# Altium schematic symbol library Connector.SchLib: 231 symbols (part 2 of 2)
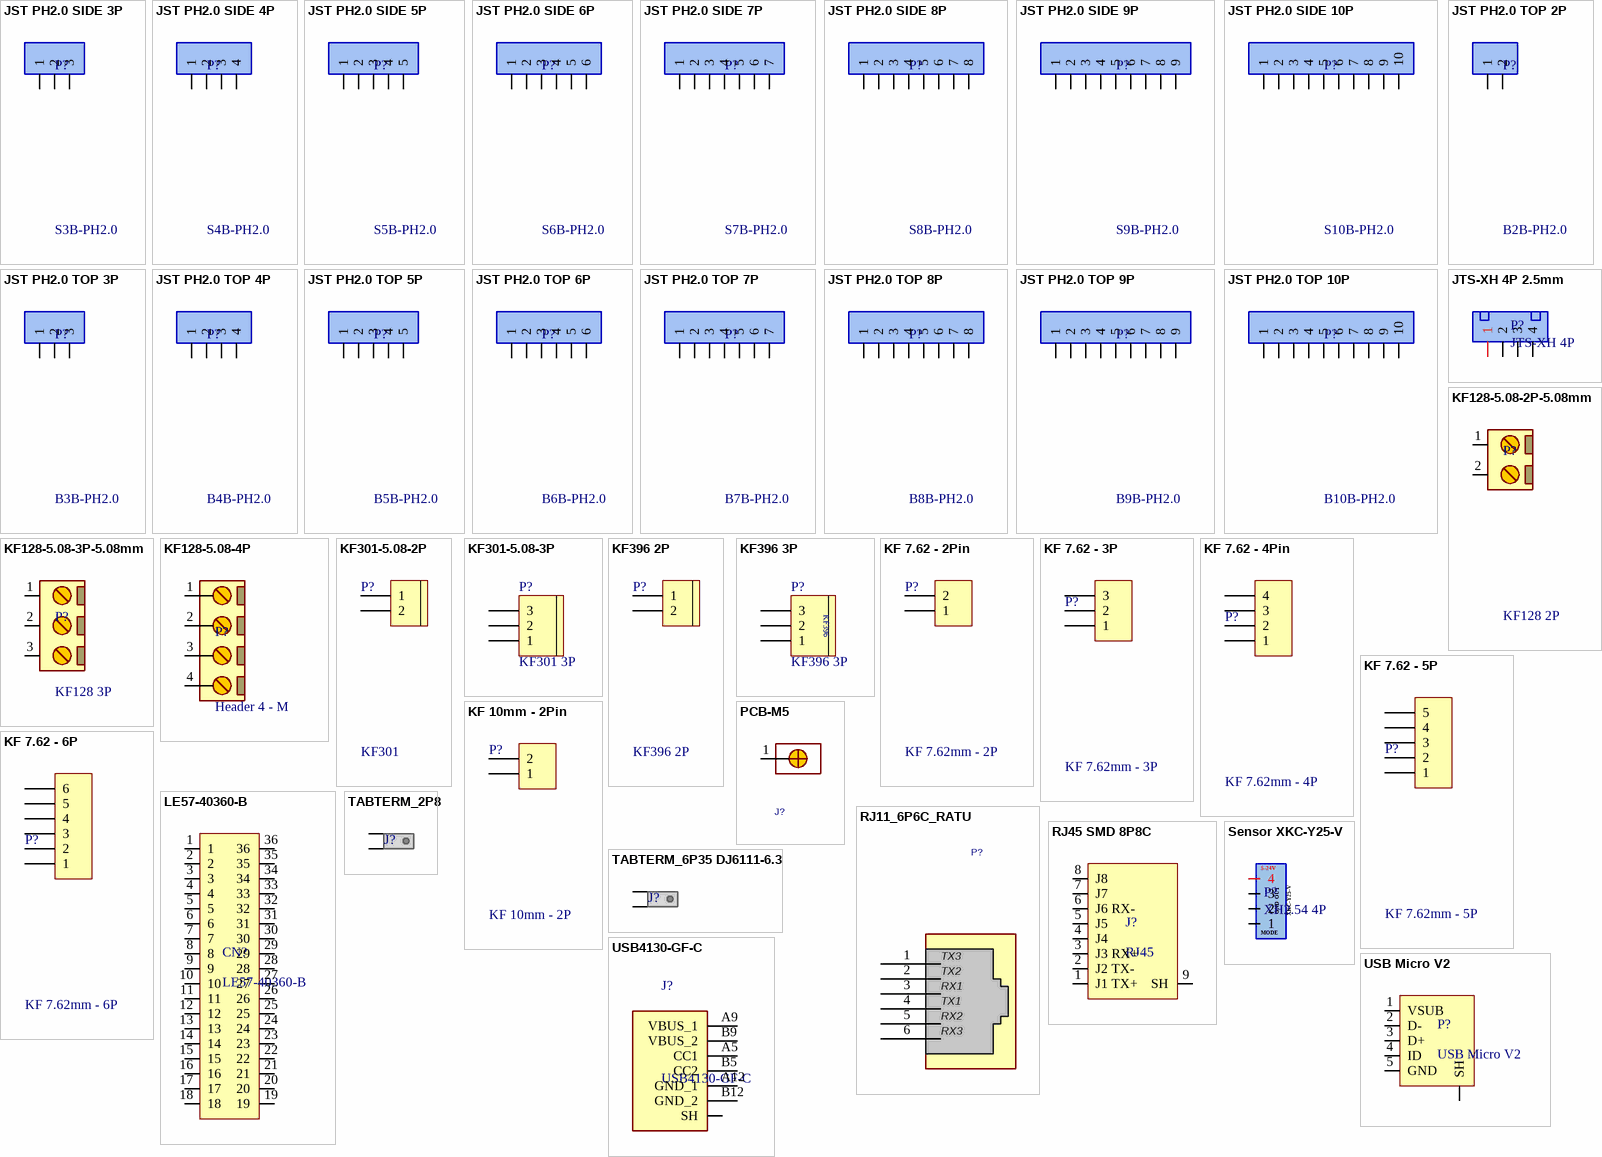
[diagram p7: symbols JST PH2.0 SIDE 3P to USB Micro V2]

## TABTERM_2P8
designator J?
Tab terminal FASTON 110, 2.8 mm width, 0.8 mm thickness
footprint TABTERM_2P8 (Tab terminal FASTON 110, 2.8 mm width, 0.8 mm thickness)
pins: 1, 2

## TABTERM_6P35 DJ6111-6.3
designator J?, comment DJ6111  (value not drawn)
Tab terminal FASTON 250, 6.35 mm width, 0.8 mm thickness; Code: 3007-037
footprint TABTERM_6P35 (Tab terminal FASTON 250, 6.35 mm width, 0.8 mm thickness)
pins: 1, 2

## USB4130-GF-C
designator J?
USB-C (USB TYPE-C) Receptacle Connector 24 (6+18 Dummy) Position Surface Mount, Through Hole; Code: N/A
footprint USB4130GFC
pins: A5 CC1, A9 VBUS_1, A12 GND_1, B5 CC2, B9 VBUS_2, B12 GND_2, SH

## USB Micro V2
designator P?
5 Pin, Imax 1.8A, 90*, SMD; Code: 3517-008; Designed by: nhox; Rule: UNIONINDEX=0|RULEKIND=Clearance|NETSCOPE=DifferentNets|LAYERKIND=SameLayer|NAME=Schematic Clearance Constraint|GAP=10mil|GENERICCLEARANCE=10mil|IGNOREPADTOPADCLEARANCEINFOOTPRINT=FALSE|OBJECTCLEARANCES=ClearanceObj_Arc-ClearanceObj_SMDPad:50000;ClearanceObj_Arc-ClearanceObj_Hole:0;ClearanceObj_Track-ClearanceObj_SMDPad:50000;ClearanceObj_Track-ClearanceObj_Hole:0;ClearanceObj_SMDPad-ClearanceObj_SMDPad:50000;ClearanceObj_SMDPad-ClearanceObj_Fill:50000;ClearanceObj_SMDPad-ClearanceObj_Poly:50000;ClearanceObj_SMDPad-ClearanceObj_Region:50000;ClearanceObj_SMDPad-ClearanceObj_Hole:0;ClearanceObj_THPad-ClearanceObj_Hole:0;ClearanceObj_Via-ClearanceObj_Hole:0;ClearanceObj_Fill-ClearanceObj_Hole:0;ClearanceObj_Poly-ClearanceObj_Hole:0;ClearanceObj_Region-ClearanceObj_Hole:0;ClearanceObj_Text-ClearanceObj_Hole:0|UNIT=Imperial
footprint USB MICRO v2
footprint 629105150921 (Micro USB 2.0 Type AB Horizontal)
pins: 1 VSUB, 2 D-, 3 D+, 4 ID, 5 GND, SH1 SH

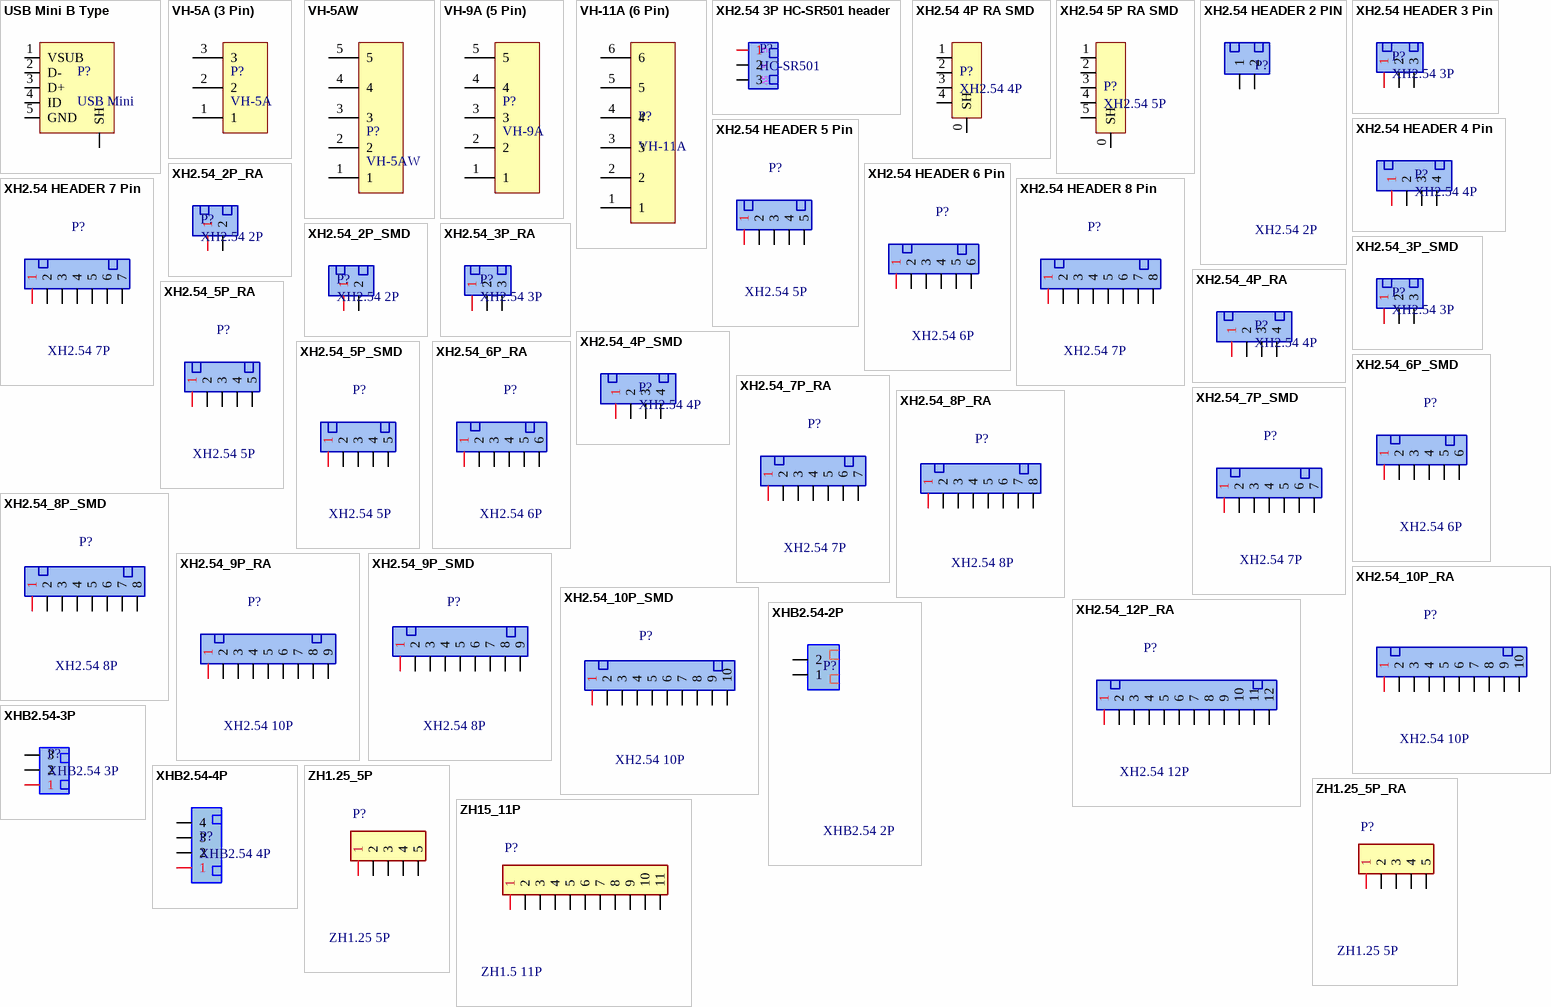
[diagram p5: symbols USB Mini B Type to ZH15_11P]

## USB Mini B Type
designator P?, comment USB Mini
USB Mini B Type, 5 Pin, Imax 1.0A, SMD; Code: 3517-030; Designed by: nhox; Rule: UNIONINDEX=0|RULEKIND=Clearance|NETSCOPE=DifferentNets|LAYERKIND=SameLayer|NAME=Schematic Clearance Constraint|GAP=10mil|GENERICCLEARANCE=10mil|IGNOREPADTOPADCLEARANCEINFOOTPRINT=FALSE|OBJECTCLEARANCES=ClearanceObj_Arc-ClearanceObj_SMDPad:50000;ClearanceObj_Arc-ClearanceObj_Hole:0;ClearanceObj_Track-ClearanceObj_SMDPad:50000;ClearanceObj_Track-ClearanceObj_Hole:0;ClearanceObj_SMDPad-ClearanceObj_SMDPad:50000;ClearanceObj_SMDPad-ClearanceObj_Fill:50000;ClearanceObj_SMDPad-ClearanceObj_Poly:50000;ClearanceObj_SMDPad-ClearanceObj_Region:50000;ClearanceObj_SMDPad-ClearanceObj_Hole:0;ClearanceObj_THPad-ClearanceObj_Hole:0;ClearanceObj_Via-ClearanceObj_Hole:0;ClearanceObj_Fill-ClearanceObj_Hole:0;ClearanceObj_Poly-ClearanceObj_Hole:0;ClearanceObj_Region-ClearanceObj_Hole:0;ClearanceObj_Text-ClearanceObj_Hole:0|UNIT=Imperial
footprint USB_MINI_B_Type (5075BMR-05-SM)
pins: 0 SH, 1 VSUB, 2 D-, 3 D+, 4 ID, 5 GND

## VH-5A (3 Pin)
designator P?, comment VH-5A
VH-5A 3.96mm; Designed by: nhox; Code: N/A
footprint VH-5A-(3 PIN)
pins: 1, 2, 3

## VH-5AW
designator P?
VH-5AW 3.96mm; Code: N/A
footprint VH-5AW 3.96mm (3.96mm)
pins: 1, 2, 3, 4, 5

## VH-9A (5 Pin)
designator P?, comment VH-9A
VH-9A 3.96mm; Designed by: nhox; Code: N/A
footprint VH-9A (5 Pin)
pins: 1, 2, 3, 4, 5

## VH-11A (6 Pin)
designator P?, comment VH-11A
VH-11A 3.96mm; Designed by: nhox; Code: N/A
footprint VH-11A-(6 PIN)
pins: 1, 2, 3, 4, 5, 6

## XH2.54 3P HC-SR501 header
designator P?, comment HC-SR501
HC-SR501 XH-T-3 HEADER 3 Pin XH2.54 / Them connetor xh2.54 4P; Code: M-6103-017, 3509-002
footprint XH2.54_3P (PW10-xx-M, JST-BxB-XH-A pitch: 2.5mm)
pins: 1, 2, 3
text: G; S; 5V

## XH2.54 4P RA SMD
designator P?, comment XH2.54 4P
XH2.54 4P RA SMD; Designed by: Nhox; Code: N/A
footprint XH2.54-4P-RA-SMD
pins: 0 SH, 1, 2, 3, 4

## XH2.54 5P RA SMD
designator P?, comment XH2.54 5P
XH2.54 5P RA SMD; Designed by: Nhox; Code: N/A
footprint XH2.54-5P-RA-SMD
pins: 0 SH, 1, 2, 3, 4, 5

## XH2.54 HEADER 2 PIN
designator P?, comment XH2.54 2P
Header XH2.54mm P; Code: 3509-001; ComponentLink1 Description: Manufacturer; ComponentLink2 Description: Datasheet; ComponentLink1URL: http://www.we-online.com; ComponentLink2URL: http://katalog.we-online.de/em/datasheet/6130xx143121.pdf
footprint XH2.54_2P (PW10-xx-M, JST-BxB-XH-A pitch: 2.5mm)
pins: 1, 2

## XH2.54 HEADER 3 Pin
designator P?, comment XH2.54 3P
XH-T-3 HEADER 3 Pin XH2.54; Code: 3509-002
footprint XH2.54_3P (PW10-xx-M, JST-BxB-XH-A pitch: 2.5mm)
pins: 1, 2, 3

## XH2.54 HEADER 4 Pin
designator P?, comment XH2.54 4P
XH-T-4 HEADER 4 Pin XH2.54; Code: 3509-003
footprint XH2.54_4P (PW10-xx-M, JST-BxB-XH-A pitch: 2.5mm)
pins: 1, 2, 3, 4

## XH2.54 HEADER 5 Pin
designator P?, comment XH2.54 5P
XH-T-5 HEADER 5 Pin XH2.54; Code: 3509-004
footprint XH2.54_5P (PW10-xx-M, JST-BxB-XH-A pitch: 2.5mm)
pins: 1, 2, 3, 4, 5

## XH2.54 HEADER 6 Pin
designator P?, comment XH2.54 6P
XH-T-6 HEADER 6 Pin XH2.54; Code: 3509-005
footprint XH2.54_6P (PW10-xx-M, JST-BxB-XH-A pitch: 2.5mm)
pins: 1, 2, 3, 4, 5, 6

## XH2.54 HEADER 7 Pin
designator P?, comment XH2.54 7P
XH-T-7 HEADER 7 Pin XH2.54; Code: 3509-006; Designed by: TranLuyen
footprint XH2.54_7P (PW10-xx-M, JST-BxB-XH-A pitch: 2.5mm)
pins: 1, 2, 3, 4, 5, 6, 7

## XH2.54 HEADER 8 Pin
designator P?, comment XH2.54 7P
XH-T-8 HEADER 8 Pin XH2.54; Code: 3509-007; Designed by: TranLuyen
footprint XH2.54_8P (PW10-xx-M, JST-BxB-XH-A pitch: 2.5mm)
pins: 1, 2, 3, 4, 5, 6, 7, 8

## XH2.54_2P_RA
designator P?, comment XH2.54 2P
XH2.54 RA; Code: 3509-010
footprint XH2.54_2P_RA
pins: 1, 2

## XH2.54_2P_SMD
designator P?, comment XH2.54 2P
XH2.54; Code: 3509-087
footprint XH2.54_2P SMD (XH2.54 SMD 2.54 mm)
pins: 1, 2

## XH2.54_3P_RA
designator P?, comment XH2.54 3P
XH2.54 RA; Code: 3509-011; Designed by: Nhox
footprint XH2.54_3P_RA
pins: 1, 2, 3

## XH2.54_3P_SMD
designator P?, comment XH2.54 3P
XH2.54 SMD; Code: 3509-088; Designed by: TranLuyen
footprint XH2.54_3P SMD (XH2.54 SMD 2.54 mm)
pins: 1, 2, 3

## XH2.54_4P_RA
designator P?, comment XH2.54 4P
XH2.54 RA; Code: 3509-012
footprint XH2.54_4P_RA
pins: 1, 2, 3, 4

## XH2.54_4P_SMD
designator P?, comment XH2.54 4P
XH2.54 SMD; Code: 3509-089
footprint XH2.54_4P SMD (XH2.54 SMD 2.54 mm)
pins: 1, 2, 3, 4

## XH2.54_5P_RA
designator P?, comment XH2.54 5P
XH2.54 RA; Code: 3509-013
footprint XH2.54_5P_RA
pins: 1, 2, 3, 4, 5

## XH2.54_5P_SMD
designator P?, comment XH2.54 5P
XH2.54 SMD; Code: 3509-090
footprint XH2.54_5P SMD (XH2.54 SMD 2.54 mm)
pins: 1, 2, 3, 4, 5

## XH2.54_6P_RA
designator P?, comment XH2.54 6P
XH2.54 RA; Code: 3509-014
footprint XH2.54_6P_RA
pins: 1, 2, 3, 4, 5, 6

## XH2.54_6P_SMD
designator P?, comment XH2.54 6P
XH2.54 SMD; Code: 3509-091
footprint XH2.54_6P SMD (XH2.54 SMD 2.54 mm)
pins: 1, 2, 3, 4, 5, 6

## XH2.54_7P_RA
designator P?, comment XH2.54 7P
XH2.54 RA; Code: 3509-015; Designed by: Nhox
footprint XH2.54_7P_RA
pins: 1, 2, 3, 4, 5, 6, 7

## XH2.54_7P_SMD
designator P?, comment XH2.54 7P
XH2.54 SMD; Code: 3509-092; Designed by: TranLuyen
footprint XH2.54_7P SMD (XH2.54 SMD 2.54 mm)
pins: 1, 2, 3, 4, 5, 6, 7

## XH2.54_8P_RA
designator P?, comment XH2.54 8P
XH2.54 RA; Code: 3509-016; Designed by: TranLuyen
footprint XH2.54_8P_RA
pins: 1, 2, 3, 4, 5, 6, 7, 8

## XH2.54_8P_SMD
designator P?, comment XH2.54 8P
XH2.54 SMD; Code: 3509-016; Designed by: TranLuyen
footprint XH2.54_8P SMD (XH2.54 SMD 2.54 mm)
pins: 1, 2, 3, 4, 5, 6, 7, 8

## XH2.54_9P_RA
designator P?, comment XH2.54 10P
XH2.54 RA; Code: 3509-018
footprint XH2.54_9P_RA
pins: 1, 2, 3, 4, 5, 6, 7, 8, 9

## XH2.54_9P_SMD
designator P?, comment XH2.54 8P
XH2.54 SMD; Designed by: TranLuyen; Code: N/A
footprint XH2.54_9P SMD (XH2.54 SMD 2.54 mm)
pins: 1, 2, 3, 4, 5, 6, 7, 8, 9

## XH2.54_10P_RA
designator P?, comment XH2.54 10P
XH2.54 RA; Code: 3509-018
footprint XH2.54_10P_RA
pins: 1, 2, 3, 4, 5, 6, 7, 8, 9, 10

## XH2.54_10P_SMD
designator P?, comment XH2.54 10P
XH2.54 SMD; Designed by: TranLuyen; Code: N/A
footprint XH2.54_10P SMD (XH2.54 SMD 2.54 mm)
pins: 1, 2, 3, 4, 5, 6, 7, 8, 9, 10

## XH2.54_12P_RA
designator P?, comment XH2.54 12P
XH2.54 RA; Code: N/A
footprint XH2.54_12P_RA
pins: 1, 2, 3, 4, 5, 6, 7, 8, 9, 10, 11, 12

## XHB2.54-2P
designator P?, comment XHB2.54 2P
Connector HEADER 2 Pin XHB2.54; Designed by: TranLuyen; ComponentLink1 Description: Manufacturer; ComponentLink2 Description: Datasheet; Code: N/A; ComponentLink1URL: http://www.we-online.com; ComponentLink2URL: http://katalog.we-online.de/em/datasheet/6130xx143121.pdf
footprint XHB2.54 - 2P
pins: 1, 2

## XHB2.54-3P
designator P?, comment XHB2.54 3P
Connector HEADER 3 Pin XHB2.54; Designed by: TranLuyen; Code: N/A
footprint XHB2.54 - 3P
pins: 1, 2, 3

## XHB2.54-4P
designator P?, comment XHB2.54 4P
Connector HEADER 4 Pin XHB2.54; Designed by: TranLuyen; Code: N/A
footprint XHB2.54 - 4P
pins: 1, 2, 3, 4

## ZH1.25_5P
designator P?, comment ZH1.25 5P
ZH1.25; Code: 3507-004; Designed by: TranLuyen; ComponentLink1Description: 3D; ComponentLink1URL: https://grabcad.com/library/jst-gh-1-25mm-connector-set-1
footprint ZH1.25_5P
pins: 1, 2, 3, 4, 5

## ZH1.25_5P_RA
designator P?, comment ZH1.25 5P
ZH1.25 RA; Code: N/A; ComponentLink1Description: 3D; ComponentLink1URL: https://grabcad.com/library/jst-gh-1-25mm-connector-set-1
footprint ZH1.25_5P_RA
pins: 1, 2, 3, 4, 5

## ZH15_11P
designator P?, comment ZH1.5 11P
ZH1.5; Code: N/A
footprint ZH1.5_11P
pins: 1, 2, 3, 4, 5, 6, 7, 8, 9, 10, 11

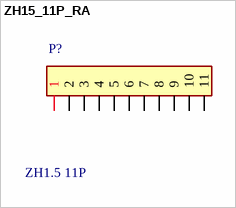
[diagram p6: symbol ZH15_11P_RA]

## ZH15_11P_RA
designator P?, comment ZH1.5 11P
ZH1.5; Code: N/A
footprint ZH1.5_11P_RA
pins: 1, 2, 3, 4, 5, 6, 7, 8, 9, 10, 11